# Altium footprint library Footprint-Lib-PhilsLab.PcbLib: 352 footprints (part 9 of 22)
Each footprint in its own frame and in the unit in brackets; x right, y up, seen from the top. Pads: shape width x height; smd on the part's side, far side on the other; paste and mask are expansions set on the pad; w line width, h text height; cw(c..) or ccw(c..) is an arc to the next point about the centre after c.
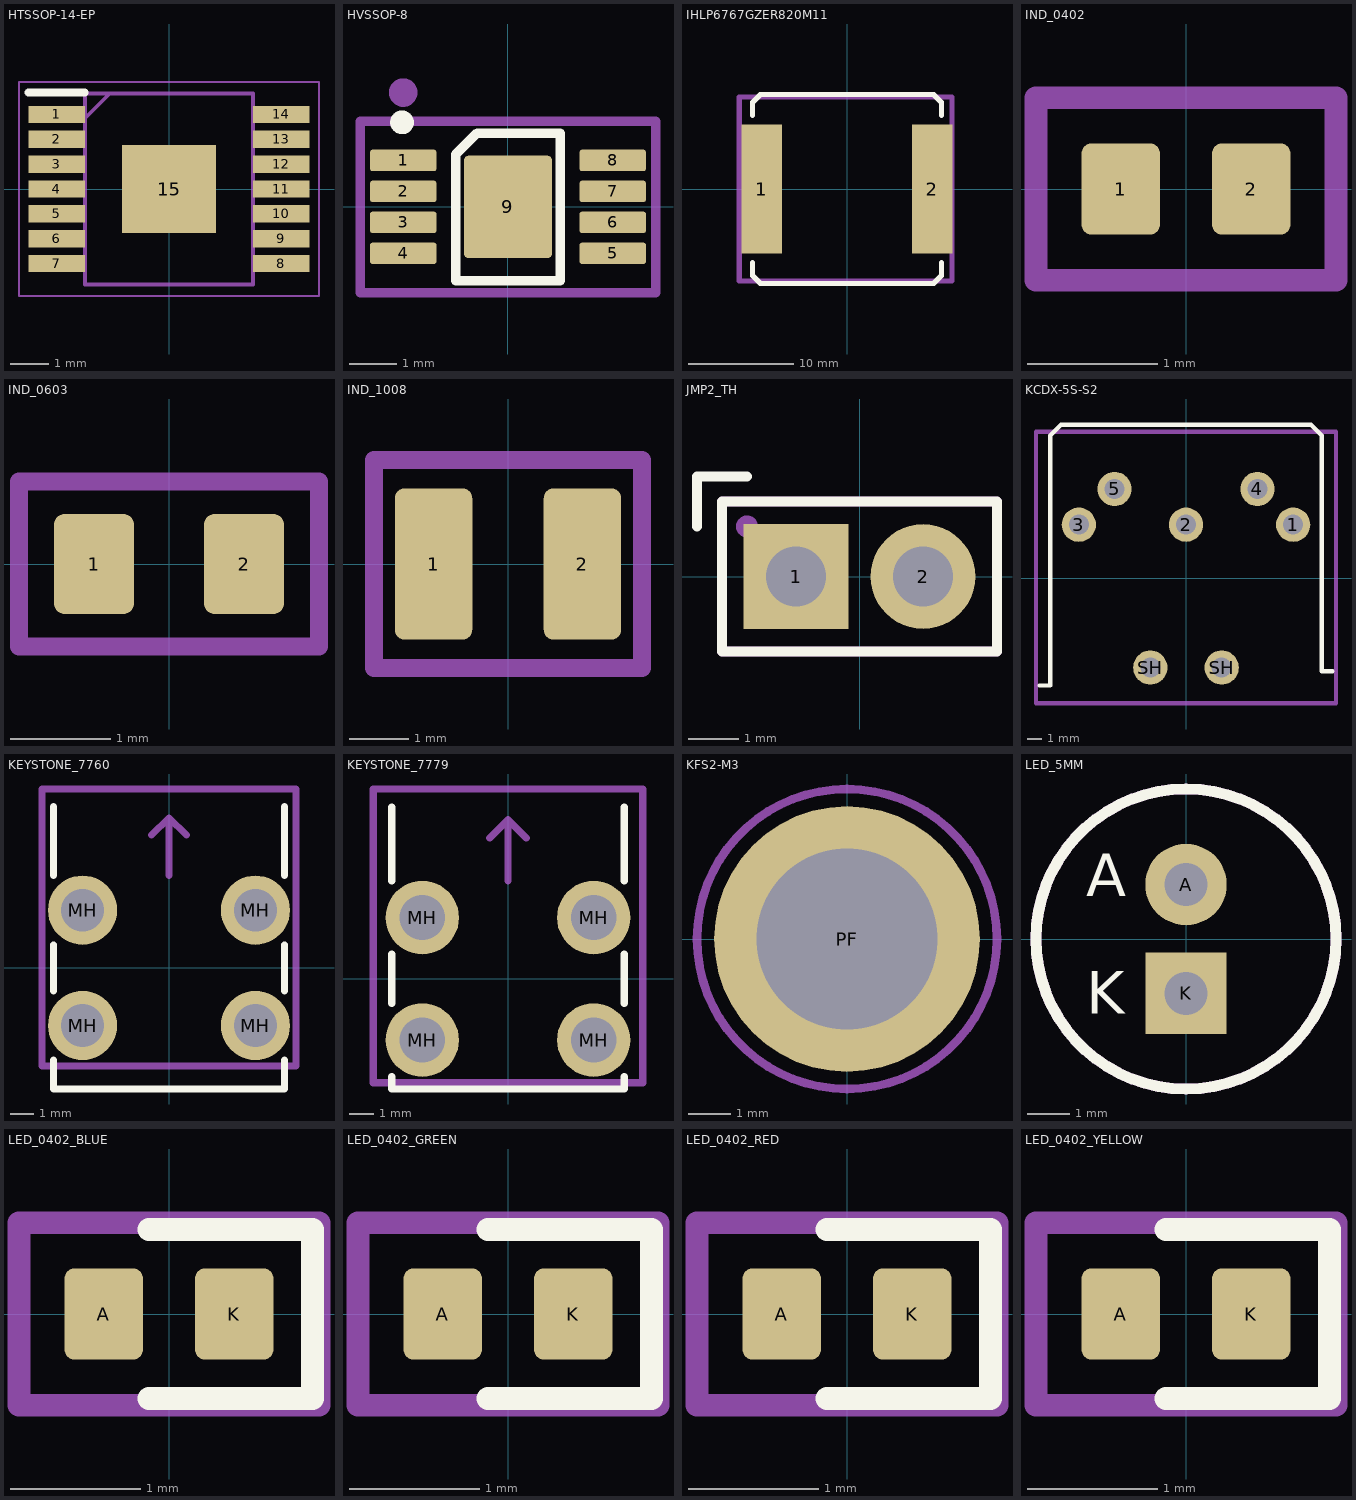
[diagram p8: the footprints below, top view; thin cyan lines are the x and y axes]

## HTSSOP-14-EP [mm]
pads (15):
  rect 1.475x0.45 smd: 1(-2.938,1.95) 2(-2.938,1.3) 3(-2.938,0.65) 4(-2.938,0) 5(-2.938,-0.65) 6(-2.938,-1.3) 7(-2.938,-1.95) 8(2.938,-1.95) 9(2.938,-1.3) 10(2.938,-0.65) 11(2.938,0) 12(2.938,0.65) 13(2.938,1.3) 14(2.938,1.95)
  rect 2.46x2.31 smd: 15(0,0)
Top Overlay:
  lines w0.2: -3.675,2.525 -2.2,2.525
Mechanical 13:
  lines w0.1: -2.2,1.85 -1.55,2.5 ; -2.2,-2.5 -2.2,2.5 2.2,2.5 2.2,-2.5 -2.2,-2.5
  text "'.Designator'" at -5.84,-0.925 h1
Mechanical 15:
  lines w0.05: -3.925,-2.8 -3.925,2.8 3.925,2.8 3.925,-2.8 -3.925,-2.8
3D body "TPS54386TPWPRQ1.stp": height 1.13, standoff 0, extent -3.2,-2.5 3.2,2.5

## HVSSOP-8 [mm]
height 1.1
pads (9):
  rrect25% 1.4x0.45 smd: 1(-2.2,0.975) 2(-2.2,0.325) 3(-2.2,-0.325) 4(-2.2,-0.975) 5(2.2,-0.975) 6(2.2,-0.325) 7(2.2,0.325) 8(2.2,0.975)
  rrect10% 1.85x2.15 smd: 9(0,0)
Top Overlay:
  circle w0.25: c-2.225,1.775 r0.125
  lines w0.2: -1.1,-1.55 -1.1,1.1 -0.65,1.55 1.1,1.55 1.1,-1.55 -1.1,-1.55
Mechanical 13:
  circle w0.3: c-2.2,2.4 r0.15
  lines w0.2: -3.1,-1.8 3.1,-1.8 3.1,1.8 -3.1,1.8 -3.1,-1.8
  text "'.Designator'" at -5.815,-0.9 h1
Mechanical 15:
  lines w0.05: -3.15,-1.8 3.15,-1.8 3.15,1.8 -3.15,1.8 -3.15,-1.8
  lines w0.1: -0.5,0 0.5,0 ; 0,-0.5 0,0.5
3D body "HVSSOP-8.step": height 1.1, standoff 0, extent -2.45,-1.55 2.45,1.55

## IHLP6767GZER820M11 [mm]
pads (2):
  rect 3.825x12.32 smd: 1(-8.12,0) 2(8.12,0)
Top Overlay:
  lines w0.5: -9,-7 -9,-8.25 -8.25,-9 8.25,-9 9,-8.25 9,-7 ; -9,7 -9,8.25 -8.25,9 8.25,9 9,8.25 9,7
Mechanical 13:
  lines w0.5: -10.25,-8.75 -10.25,8.75 10,8.75 10,-8.75 -10.25,-8.75
  text "'.Designator'" at -5.665,-0.417 h1
3D body "IHLP-6767GZ-11.STEP": height 7.01, standoff 0.01, extent -8.575,-8.575 8.575,8.575

## IND_0402 [mm]
pads (2):
  rrect25% 0.6x0.7 smd: 1(-0.5,0) 2(0.5,0)
Mechanical 13:
  lines w0.175: -1.15,-0.7 1.15,-0.7 1.15,0.7 -1.15,0.7 -1.15,-0.7
  text "'.Designator'" at -5.665,-0.417 h1
3D body "L0402.step": height 0.67, standoff 0.01, extent -0.56,-0.256 0.56,0.256

## IND_0603 [mm]
pads (2):
  rrect25% 0.8x1 smd: 1(-0.75,0) 2(0.75,0)
Mechanical 13:
  lines w0.175: -1.5,-0.825 1.5,-0.825 1.5,0.825 -1.5,0.825 -1.5,-0.825
  text "'.Designator'" at -5.665,-0.417 h1
3D body "L0603.step": height 0.87, standoff 0.01, extent -0.81,-0.365 0.81,0.365

## IND_1008 [mm]
pads (2):
  rrect25% 1.3x2.54 smd: 1(-1.25,0) 2(1.25,0)
Mechanical 13:
  lines w0.3: -2.25,-1.75 -2.25,-0.25 -2.25,1.75 2.25,1.75 2.25,-1.75 -2.25,-1.75
  text "'.Designator'" at -5.84,-0.925 h1
3D body "L1008.stp": height 1.71, standoff -0.09, extent -1.3,-1.05 1.3,1.05

## JMP2_TH [mm]
pads (2):
  rect 2.1x2.1 hole 1.2: 1(-1.27,0)
  round 2.1 hole 1.2: 2(1.27,0)
Top Overlay:
  lines w0.2: -3.25,1 -3.25,2 -2.25,2 ; -2.75,-1.5 -2.75,1.5 2.75,1.5 2.75,-1.5 -2.75,-1.5
Mechanical 13:
  circle w0.254: c-2.25,1 r0.093
  lines w0.2: -2.75,-1.5 -2.75,1.5 2.75,1.5 2.75,-1.5 -2.75,-1.5
  text ".Designator" at -4.998,-0.333 h1

## KCDX-5S-S2 [mm]
pads (7):
  round 2.4 hole 1.4: 1(7.5,3.75) 2(0,3.75) 3(-7.5,3.75) 4(5,6.25) 5(-5,6.25) SH(-2.5,-6.25) SH(2.5,-6.25)
Top Overlay:
  lines w0.3: -10.25,-7.5 -9.5,-7.5 -9.5,10 -8.75,10.75 0.25,10.75 8.75,10.75 9.5,10 9.5,-6.5 10.25,-6.5
Mechanical 13:
  lines w0.3: -10.5,-8.75 10.5,-8.75 10.5,10.25 -10.5,10.25 -10.5,-8.75
  text ".Designator" at -4.998,-0.333 h1
3D body "KCDX-5S-N2.STEP": height 19.51, standoff -3.99, extent -10.5,-8.75 10.5,10.25

## KEYSTONE_7760 [mm]
pads (4):
  round 3 hole 1.85 paste-2539.97: MH(-3.745,-2.5) MH(-3.745,2.5) MH(3.745,-2.5) MH(3.745,2.5)
Top Overlay:
  lines w0.3: -5,-4 -5,-5.25 5,-5.25 5,-4 ; -5,-1 -5,1 ; -5,4 -5,7 ; 5,-1 5,1 ; 5,4 5,7
Mechanical 13:
  lines w0.3: -0.75,5.75 0,6.5 ; 0,4 0,6.5 ; 0.75,5.75 0,6.5 ; 0,6.5 0,6.5 ; 0,6.5 0,6.5 ; -5.5,-4.25 5.5,-4.25 5.5,7.75 -5.5,7.75 -5.5,-4.25
  text "'.Designator'" at -5.815,-0.9 h1
3D body "Keystone-7760.STEP": height 7.99, standoff -5.02, extent -4.707,-4.023 4.707,7.5

## KEYSTONE_7779 [mm]
pads (4):
  round 3 hole 1.85 paste-2539.97: MH(-3.5,-2.5) MH(-3.5,2.5) MH(3.5,-2.5) MH(3.5,2.5)
Top Overlay:
  lines w0.3: -4.75,-4 -4.75,-4.5 4.75,-4.5 4.75,-4 ; -4.75,-1 -4.75,1 ; -4.75,4 -4.75,7 ; 4.75,-1 4.75,1 ; 4.75,4 4.75,7
Mechanical 13:
  lines w0.3: -0.75,5.75 0,6.5 ; 0,4 0,6.5 ; 0.75,5.75 0,6.5 ; 0,6.5 0,6.5 ; 0,6.5 0,6.5 ; -5.5,-4.25 -5.5,7.75 5.5,7.75 5.5,-4.25 -5.5,-4.25
  text "'.Designator'" at -5.815,-0.9 h1
3D body "keystone-PN7779.STEP": height 7.99, standoff -5.02, extent -5.2,-4.009 5.2,7.5

## KFS2-M3 [mm]
pads (1):
  round 6.2 hole 4.22: PF(0,0)
Mechanical 13:
  lines w0.2: -3.5,0 cw(c0,0) 0,3.5 cw(c0,0) 3.5,0 cw(c0,0) 0,-3.5 cw(c0,0) -3.5,0
  text "PRESS-FIT" at -2.274,1.1 h0.5
  text "'.Designator'" at -5.815,-0.9 h1
3D body "KFS2-M3.stp": height 1.51, standoff -1.52, extent -2.78,-2.78 2.781,2.78

## LED_5MM [mm]
pads (2):
  round 1.9 hole 1: A(0,1.27)
  rect 1.9x1.9 hole 1: K(0,-1.27)
Top Overlay:
  circle w0.254: c0,0 r3.5
  text "K" at -2.333,-1.75 h1
  text "A" at -2.333,1 h1
Bottom Overlay:
  circle w0.254: c0,0 r3.5
  text "A" at -1.667,1 h1
  text "K" at -1.667,-1.75 h1
Mechanical 13:
  circle w0.254: c0,0 r3.5
  text "K" at -0.333,-1.75 h1
  text "A" at -0.333,1 h1
  text "'.Designator'" at -5.665,-0.417 h1
3D body "LED-5mm.STEP": height 21.8, standoff -14, extent -3,-2.5 3,3

## LED_0402_BLUE [mm]
pads (2):
  rrect25% 0.6x0.7 smd: A(-0.5,0) K(0.5,0)
Top Overlay:
  lines w0.175: -0.153,-0.647 1.1,-0.647 1.1,0.647 -0.153,0.647
Mechanical 13:
  lines w0.175: -1.15,-0.7 1.15,-0.7 1.15,0.7 -1.15,0.7 -1.15,-0.7
  text "'.Designator'" at -5.665,-0.29 h1
  text "+" at -1.883,0.508 h0.5
3D body "LED0402-Blue.step": height 0.45, standoff 0, extent -0.505,-0.25 0.505,0.25

## LED_0402_GREEN [mm]
pads (2):
  rrect25% 0.6x0.7 smd: A(-0.5,0) K(0.5,0)
Top Overlay:
  lines w0.175: -0.153,-0.647 1.1,-0.647 1.1,0.647 -0.153,0.647
Mechanical 13:
  lines w0.175: -1.15,-0.7 -1.15,0.7 1.15,0.7 1.15,-0.7 -1.15,-0.7
  text "'.Designator'" at -5.665,-0.29 h1
  text "+" at -1.883,0.508 h0.5
3D body "LED0402-Green.step": height 0.45, standoff 0, extent -0.505,-0.25 0.505,0.25

## LED_0402_RED [mm]
pads (2):
  rrect25% 0.6x0.7 smd: A(-0.5,0) K(0.5,0)
Top Overlay:
  lines w0.175: -0.153,-0.647 1.1,-0.647 1.1,0.647 -0.153,0.647
Mechanical 13:
  lines w0.175: -1.15,-0.7 1.15,-0.7 1.15,0.7 -1.15,0.7 -1.15,-0.7
  text "'.Designator'" at -5.665,-0.29 h1
  text "+" at -1.883,0.508 h0.5
3D body "LED0402-Red.step": height 0.45, standoff 0, extent -0.505,-0.25 0.505,0.25

## LED_0402_YELLOW [mm]
pads (2):
  rrect25% 0.6x0.7 smd: A(-0.5,0) K(0.5,0)
Top Overlay:
  lines w0.175: -0.153,-0.647 1.1,-0.647 1.1,0.647 -0.153,0.647
Mechanical 13:
  lines w0.175: -1.15,-0.7 1.15,-0.7 1.15,0.7 -1.15,0.7 -1.15,-0.7
  text "'.Designator'" at -5.665,-0.29 h1
  text "+" at -1.883,0.508 h0.5
3D body "LED0402-Yellow.step": height 0.45, standoff 0, extent -0.505,-0.25 0.505,0.25